# Altium integrated library TP5100_Module.IntLib: 1 symbol
Pins are listed as number, name and electrical type; pins without a type are passive.

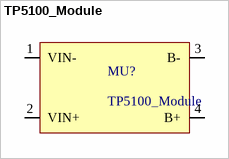
[diagram p0: symbol TP5100_Module]

## TP5100_Module
designator MU?
pins: 1 VIN-, 2 VIN+, 3 B-, 4 B+